# Altium footprint library UCP.PcbLib: 222 footprints (part 7 of 14)
Each footprint in its own frame and in the unit in brackets; x right, y up, seen from the top. Pads: shape width x height; smd on the part's side, far side on the other; paste and mask are expansions set on the pad; w line width, h text height; cw(c..) or ccw(c..) is an arc to the next point about the centre after c.
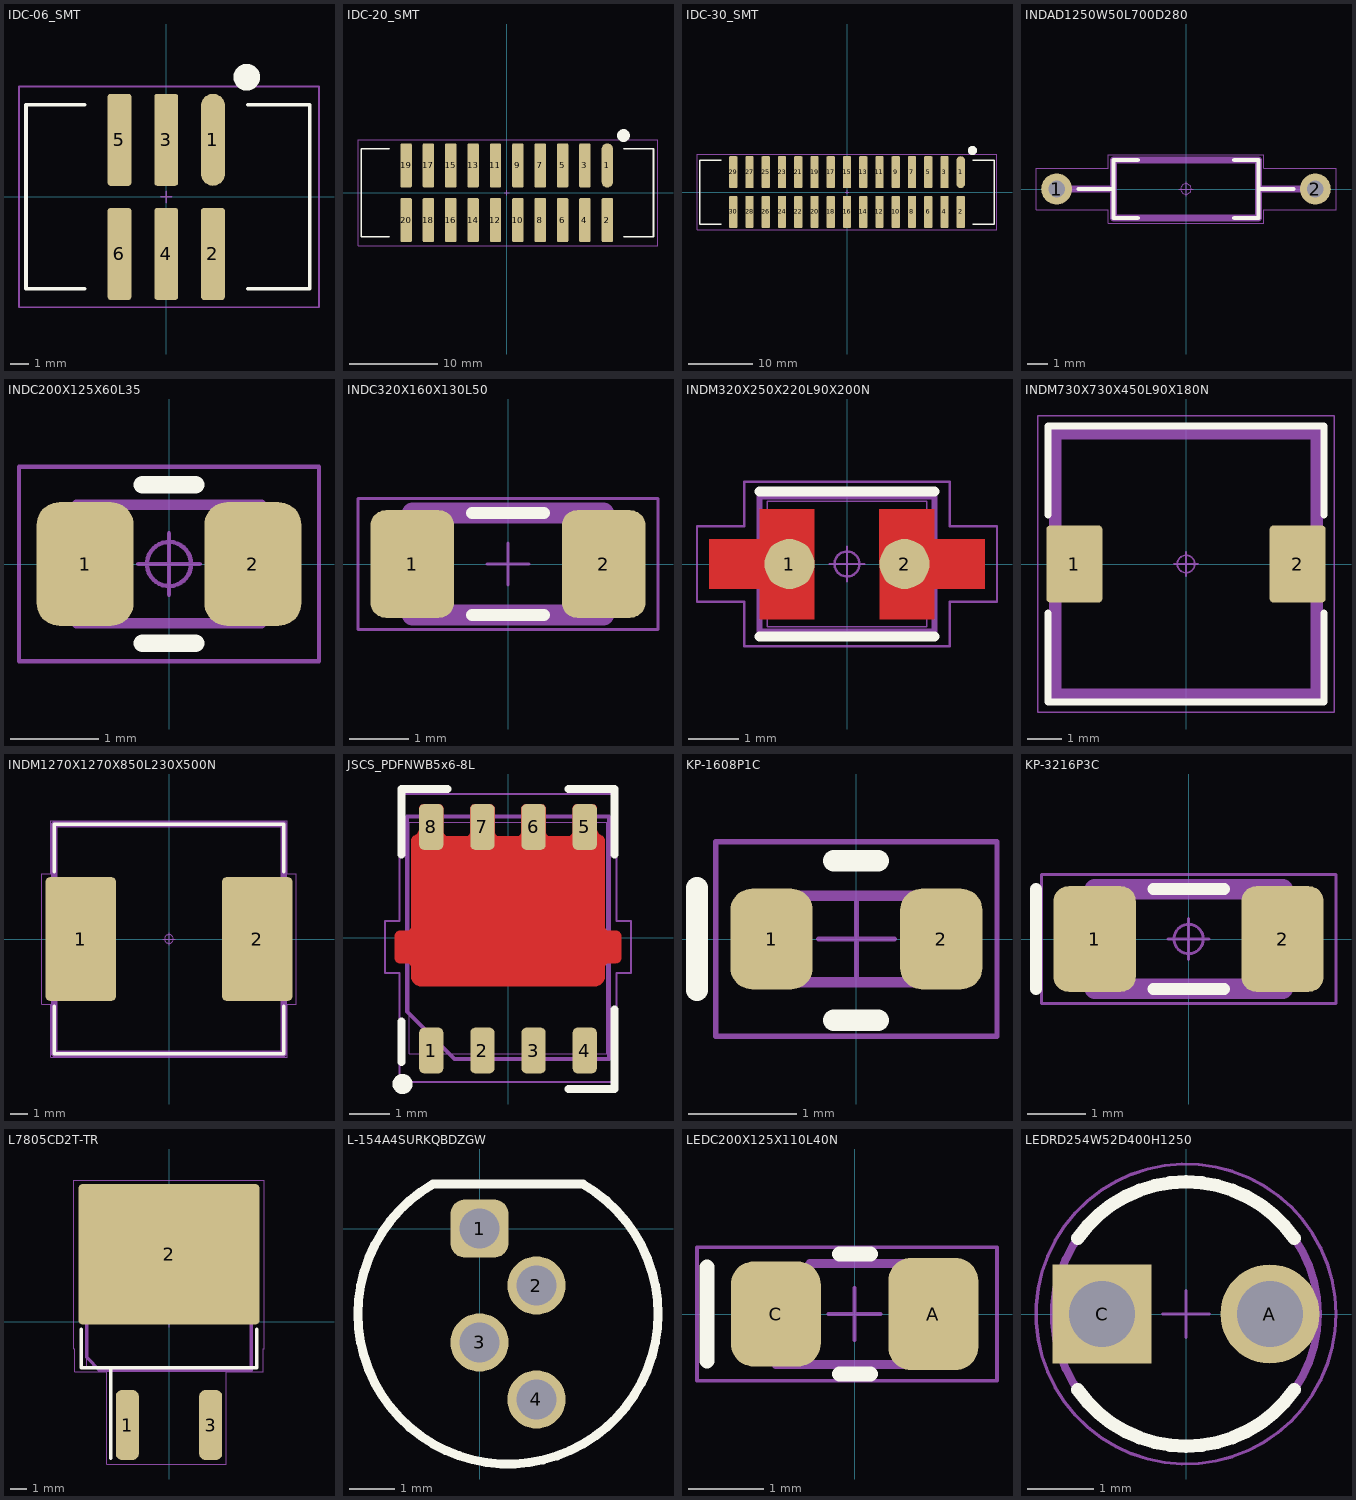
[diagram p6: the footprints below, top view; thin cyan lines are the x and y axes]

## IDC-06_SMT [mm]
height 10.5
pads (6):
  oval 1.3x5 smd: 1(2.54,3.1)
  rrect25% 1.3x5 smd: 2(2.54,-3.1) 3(0,3.1) 4(0,-3.1) 5(-2.54,3.1) 6(-2.54,-3.1)
Top Overlay:
  circle w0.75: c4.375,6.5 r0.35
  lines w0.2: -4.445,-5 -7.62,-5 -7.62,5 -4.445,5 ; 4.445,-5 7.8,-5 7.8,5 4.445,5
Top Designator:
  text ".Designator" at -4.511,-0.453 h2
Top Courtyard:
  lines w0.1: -0.3,0 0.3,0 ; 0,-0.3 0,0.3 ; -8,-6 -8,6 8.3,6 8.3,-6 -8,-6
3D body "BH_06_M.stp": height 10.12, standoff 0, extent -7.42,-4.8 7.62,4.8

## IDC-20_SMT [mm]
height 10.5
pads (20):
  oval 1.3x5 smd: 1(11.43,3.1)
  rrect25% 1.3x5 smd: 2(11.43,-3.1) 3(8.89,3.1) 4(8.89,-3.1) 5(6.35,3.1) 6(6.35,-3.1) 7(3.81,3.1) 8(3.81,-3.1) 9(1.27,3.1) 10(1.27,-3.1) 11(-1.27,3.1) 12(-1.27,-3.1) 13(-3.81,3.1) 14(-3.81,-3.1) 15(-6.35,3.1) 16(-6.35,-3.1) 17(-8.89,3.1) 18(-8.89,-3.1) 19(-11.43,3.1) 20(-11.43,-3.1)
Top Overlay:
  circle w0.75: c13.265,6.5 r0.35
  lines w0.2: -13.335,-5 -16.51,-5 -16.51,5 -13.335,5 ; 13.335,-5 16.69,-5 16.69,5 13.335,5
Top Designator:
  text ".Designator" at -4.511,-0.453 h2
Top Courtyard:
  lines w0.1: -0.3,0 0.3,0 ; 0,-0.3 0,0.3 ; -16.89,-6 -16.89,6 17.19,6 17.19,-6 -16.89,-6
3D body "61232020621.stp": height 10.55, standoff 0.04, extent -16.51,-4.75 16.51,4.75

## IDC-30_SMT [mm]
height 10.5
pads (30):
  oval 1.3x5 smd: 1(17.78,3.1)
  rrect25% 1.3x5 smd: 2(17.78,-3.1) 3(15.24,3.1) 4(15.24,-3.1) 5(12.7,3.1) 6(12.7,-3.1) 7(10.16,3.1) 8(10.16,-3.1) 9(7.62,3.1) 10(7.62,-3.1) 11(5.08,3.1) 12(5.08,-3.1) 13(2.54,3.1) 14(2.54,-3.1) 15(0,3.1) 16(0,-3.1) 17(-2.54,3.1) 18(-2.54,-3.1) 19(-5.08,3.1) 20(-5.08,-3.1) 21(-7.62,3.1) 22(-7.62,-3.1) 23(-10.16,3.1) 24(-10.16,-3.1) 25(-12.7,3.1) 26(-12.7,-3.1) 27(-15.24,3.1) 28(-15.24,-3.1) 29(-17.78,3.1) 30(-17.78,-3.1)
Top Overlay:
  circle w0.75: c19.615,6.5 r0.35
  lines w0.2: -19.685,-5 -23.05,-5 -23.05,5 -19.685,5 ; 19.685,-5 23.05,-5 23.05,5 19.685,5
Top Designator:
  text ".Designator" at -4.511,-0.453 h2
Top Courtyard:
  lines w0.1: -0.3,0 0.3,0 ; 0,-0.3 0,0.3 ; -23.45,-5.9 -23.45,5.9 23.45,5.9 23.45,-5.9 -23.45,-5.9
3D body "IDC-30.stp": height 10.2, standoff 0, extent -22.85,-4.75 22.85,4.75

## INDAD1250W50L700D280 [mm] "Inductor, Axial; 12.50 mm C X 0.50 mm W 7.00 mm L X 2.80 mm Dia body"
height 2.8
pads (2):
  round 1.5 hole 0.8 paste-1.5: 1(-6.25,0) 2(6.25,0)
Top Overlay:
  lines w0.2: -5.2,0 -3.5,0 ; -2.33,-1.4 -3.5,-1.4 -3.5,1.4 -2.33,1.4 ; 2.33,-1.4 3.5,-1.4 3.5,1.4 2.33,1.4 ; 3.5,0 5.2,0
Top Designator:
  text ".Designator" at 0,0 h1.2
Top Assembly:
  lines w0.35: -5.5,0 -3.5,0 ; 3.5,0 5.5,0 ; -3.5,-1.4 -3.5,1.4 3.5,1.4 3.5,-1.4 -3.5,-1.4
Top Courtyard:
  circle w0.05: c0,0 r0.25
  lines w0.05: -0.35,0 0.35,0 ; 0,-0.35 0,0.35 ; -7.25,-1 -7.25,1 -3.75,1 -3.75,1.65 3.75,1.65 3.75,1 7.25,1 7.25,-1 3.75,-1 3.75,-1.65 -3.75,-1.65 -3.75,-1 -7.25,-1
Top Component Outline:
  lines w0.05: -3.5,-1.4 -3.5,1.4 3.5,1.4 3.5,-1.4 -3.5,-1.4
Top Component Terminal:
  circle w0.05: c-6.25,0 r0.275
  circle w0.05: c6.25,0 r0.275
3D body "INDAD1250W50L700D280.STEP": height 2.8, standoff -2, extent -6.5,-1.4 6.5,1.4

## INDC200X125X60L35 [mm] "Inductor, Chip; 2.00 mm L X 1.25 mm W X 0.60 mm H body"
height 0.6
pads (2):
  rrect46% 1.1x1.4 smd: 1(-0.95,0) 2(0.95,0)
Top Overlay:
  lines w0.2: -0.3,-0.9 0.3,-0.9 ; -0.3,0.9 0.3,0.9
Top Designator:
  text ".Designator" at -4.511,-0.453 h2
Top Assembly:
  lines w0.1: -1.05,-0.68 1.05,-0.68 1.05,0.68 -1.05,0.68 -1.05,-0.68
Top Courtyard:
  circle w0.05: c0,0 r0.25
  lines w0.05: -0.35,0 0.35,0 ; 0,-0.35 0,0.35 ; -1.7,-1.1 -1.7,1.1 1.7,1.1 1.7,-1.1 -1.7,-1.1
Top Component Outline:
  lines w0.025: -1,-0.625 1,-0.625 1,0.625 -1,0.625 -1,-0.625
Top Component Terminal:
  lines w0.025: -1,-0.625 -1,0.625 -0.5,0.625 -0.5,-0.625 -1,-0.625 ; 0.5,-0.625 1,-0.625 1,0.625 0.5,0.625 0.5,-0.625
3D body "WE-CBF_0805_CBF.stp": height 0.9, standoff 0, extent -1,-0.6 1,0.6

## INDC320X160X130L50 [mm]
height 1.3
pads (2):
  rrect36% 1.4x1.8 smd: 1(-1.6,0) 2(1.6,0)
Top Overlay:
  lines w0.2: -0.605,-0.85 0.605,-0.85 ; -0.605,0.85 0.605,0.85
Top Designator:
  text ".Designator" at 0,0 h2
Top Assembly:
  lines w0.35: -1.6,-0.85 1.6,-0.85 1.6,0.85 -1.6,0.85 -1.6,-0.85
Top Courtyard:
  lines w0.05: -0.35,0 0.35,0 ; 0,-0.35 0,0.35 ; -2.51,-1.1 2.51,-1.1 2.51,1.1 -2.51,1.1 -2.51,-1.1
Top Component Outline:
  lines w0.05: -1.55,-0.8 1.55,-0.8 1.55,0.8 -1.55,0.8 -1.55,-0.8
Top Component Terminal:
  lines w0.05: -1.55,-0.8 -1.55,0.8 -1.15,0.8 -1.15,-0.8 -1.55,-0.8 ; 1.15,-0.8 1.55,-0.8 1.55,0.8 1.15,0.8 1.15,-0.8
3D body "RESC310X160X65L40.STEP": height 0.65, standoff 0, extent -1.55,-0.8 1.55,0.8

## INDM320X250X220L90X200N [mm] "Inductor, Molded Body; 3.20 mm L X 2.50 mm W X 2.20 mm H body"
height 2.2
pads (2):
  round 1 smd: 1(-1.15,0) 2(1.15,0)
Top Layer:
  region: -2.75,0.5 -2.75,-0.5 -1.75,-0.5 -1.75,-1.1 -0.65,-1.1 -0.65,1.1 -1.75,1.1 -1.75,0.5
  region: 2.75,-0.5 2.75,0.5 1.75,0.5 1.75,1.1 0.65,1.1 0.65,-1.1 1.75,-1.1 1.75,-0.5
Top Overlay:
  lines w0.2: -1.75,-1.45 1.75,-1.45 ; -1.75,1.45 1.75,1.45
Top Designator:
  text ".Designator" at 0,0 h1.2
Top Assembly:
  lines w0.12: -1.75,-1.35 -1.75,1.35 1.75,1.35 1.75,-1.35 -1.75,-1.35
Top Courtyard:
  circle w0.05: c0,0 r0.25
  lines w0.05: -0.35,0 0.35,0 ; 0,-0.35 0,0.35 ; -3,-0.75 -3,0.75 -2.05,0.75 -2.05,1.65 2.05,1.65 2.05,0.75 3,0.75 3,-0.75 2.05,-0.75 2.05,-1.65 -2.05,-1.65 -2.05,-0.75 -3,-0.75
Top Component Outline:
  lines w0.025: -1.6,-1.25 -1.6,1.25 1.6,1.25 1.6,-1.25 -1.6,-1.25
Top Component Terminal:
  lines w0.025: -1.6,-1 -0.7,-1 -0.7,1 -1.6,1 -1.6,-1 ; 0.7,-1 0.7,1 1.6,1 1.6,-1 0.7,-1
3D body "LQH32MN220J23L.STEP": height 2.2, standoff 0, extent -1.6,-1.25 1.6,1.25

## INDM730X730X450L90X180N [mm] "Inductor, Molded Body; 7.30 mm L X 7.30 mm W X 4.50 mm H body"
height 8.5
pads (2):
  rrect12% 1.6x2.2 smd: 1(-3.2,0) 2(3.2,0)
Top Overlay:
  lines w0.2: -3.95,-1.4 -3.95,-3.95 3.95,-3.95 3.95,-1.4 ; -3.95,1.4 -3.95,3.95 3.95,3.95 3.95,1.4
Top Designator:
  text ".Designator" at 0,0 h1.2
Top Assembly:
  lines w0.35: -3.75,-3.75 3.75,-3.75 3.75,3.75 -3.75,3.75 -3.75,-3.75
Top Courtyard:
  circle w0.05: c0,0 r0.25
  lines w0.05: -0.35,0 0.35,0 ; 0,-0.35 0,0.35 ; -4.25,-4.25 -4.25,4.25 4.25,4.25 4.25,-4.25 -4.25,-4.25
Top Component Outline:
  lines w0.05: -3.75,-3.75 3.75,-3.75 3.75,3.75 -3.75,3.75 -3.75,-3.75
Top Component Terminal:
  lines w0.05: -3.6,-0.9 -3.6,0.9 -2.7,0.9 -2.7,-0.9 -3.6,-0.9 ; 2.7,-0.9 3.6,-0.9 3.6,0.9 2.7,0.9 2.7,-0.9
3D body "INDM730X730X450L90X180.stp": height 4.5, standoff 0, extent -3.75,-3.75 3.75,3.75

## INDM1270X1270X850L230X500N [mm] "Inductor, Molded Body; 12.70 mm L X 12.70 mm W X 8.50 mm H body"
height 8.5
pads (2):
  rrect12% 4x7 smd: 1(-5,0) 2(5,0)
Top Overlay:
  lines w0.2: -6.5,-3.8 -6.5,-6.5 6.5,-6.5 6.5,-3.8 ; -6.5,3.8 -6.5,6.5 6.5,6.5 6.5,3.8
Top Designator:
  text ".Designator" at 0,0 h1.2
Top Assembly:
  lines w0.35: -6.5,-6.5 6.5,-6.5 6.5,6.5 -6.5,6.5 -6.5,-6.5
Top Courtyard:
  circle w0.05: c0,0 r0.25
  lines w0.05: -0.35,0 0.35,0 ; 0,-0.35 0,0.35 ; -7.2,-3.7 -6.7,-3.7 -6.7,-6.7 6.7,-6.7 6.7,-3.7 7.2,-3.7 7.2,3.7 6.7,3.7 6.7,6.7 -6.7,6.7 -6.7,3.7 -7.2,3.7 -7.2,-3.7
Top Component Outline:
  lines w0.05: -6.35,-6.35 6.35,-6.35 6.35,6.35 -6.35,6.35 -6.35,-6.35
Top Component Terminal:
  lines w0.05: -6.35,-2.5 -6.35,2.5 -4.05,2.5 -4.05,-2.5 -6.35,-2.5 ; 4.05,-2.5 6.35,-2.5 6.35,2.5 4.05,2.5 4.05,-2.5
3D body "INDM1270X1270X850L230X500.STEP": height 8.5, standoff 0, extent -6.35,-6.35 6.35,6.35

## JSCS_PDFNWB5x6-8L [mm]
pads (8):
  rrect40% 0.6x1.135 smd paste-10: 1(-1.905,-2.794) 2(-0.635,-2.794) 3(0.635,-2.794) 4(1.905,-2.794) 5(1.905,2.758) 6(0.635,2.758) 7(-0.635,2.758) 8(-1.905,2.758)
Top Layer:
  region: 197 vertices and 0 holes, not listed, extent -2.81,-1.2 2.81,3.325
Top Overlay:
  circle w0.25: c-2.619,-3.625 r0.125
  lines w0.2: -2.65,-3.075 -2.65,-2.075 ; -2.65,2.075 -2.65,3.7 -1.5,3.7 ; 1.5,-3.75 2.65,-3.75 2.65,-1.775 ; 1.5,3.7 2.65,3.7 2.65,2.075
Top Paste:
  rectangle: 0.75,1.05 1.75,2.05
  rectangle: -0.45,1.05 0.45,2.05
  rectangle: 0.75,-0.25 1.75,0.75
  rectangle: -0.45,-0.25 0.45,0.75
  rectangle: -1.75,-0.25 -0.75,0.75
  rectangle: -1.75,1.05 -0.75,2.05
  rectangle: -2.155,-3.269 -1.655,-2.319
  rectangle: -0.885,-3.269 -0.385,-2.319
  rectangle: 0.385,-3.269 0.885,-2.319
  rectangle: 1.655,-3.269 2.155,-2.319
Top Assembly:
  lines w0.1: -2.51,-1.826 -2.51,3.018 2.506,3.018 2.506,-3.009 -1.327,-3.009 -2.51,-1.826
Top Courtyard:
  lines w0.05: -0.25,0 0.25,0 ; 0,-0.25 0,0.25 ; -3.06,-0.875 -2.7,-0.875 -2.7,-3.575 2.7,-3.575 2.7,-0.875 3.06,-0.875 3.06,0.425 2.7,0.425 2.7,3.575 -2.7,3.575 -2.7,0.425 -3.06,0.425 -3.06,-0.875
Top Component Outline:
  lines w0.025: -2.45,-2.875 -2.45,2.875 2.45,2.875 2.45,-2.875 -2.45,-2.875
Top Component Terminal:
  lines w0.025: -2.51,-0.35 -2.36,-0.35 -2.105,-0.425 -2.105,-0.525 -2.005,-0.525 -2.005,-1.1 2.005,-1.1 2.005,-0.525 2.105,-0.525 2.105,-0.425 2.36,-0.35 2.51,-0.35 2.51,-0.1 2.36,-0.1 2.105,-0.025 2.105,0.075 2.005,0.075 2.005,1.48 2.105,1.48 2.105,1.58 2.31,1.63 2.31,1.93 2.105,1.98 2.105,2.08 2.005,2.08 2.005,2.39 2.105,2.39 2.105,2.675 2.055,2.825 2.055,3.025 1.755,3.025 1.755,2.825 1.705,2.675 1.705,2.475 1.605,2.475 1.605,2.375 0.935,2.375 0.935,2.475 0.835,2.475 0.835,2.675 0.785,2.825 0.785,3.025 0.485,3.025 0.485,2.825 0.435,2.675 0.435,2.475 0.335,2.475 0.335,2.375 -0.335,2.375 -0.335,2.475 -0.435,2.475 -0.435,2.675 -0.485,2.825 -0.485,3.025 -0.785,3.025 -0.785,2.825 -0.835,2.675 -0.835,2.475 -0.935,2.475 -0.935,2.375 -1.605,2.375 -1.605,2.475 -1.705,2.475 -1.705,2.675 -1.755,2.825 -1.755,3.025 -2.055,3.025 -2.055,2.825 -2.105,2.675 -2.105,2.39 -2.005,2.39 -2.005,2.08 -2.105,2.08 -2.105,1.98 -2.31,1.93 -2.31,1.63 -2.105,1.58 -2.105,1.48 -2.005,1.48 -2.005,0.075 -2.105,0.075 -2.105,-0.025 -2.36,-0.1 -2.51,-0.1 -2.51,-0.35 ; -2.105,-2.675 -2.105,-2.39 -1.705,-2.39 -1.705,-2.675 -1.755,-2.825 -1.755,-3.025 -2.055,-3.025 -2.055,-2.825 -2.105,-2.675 ; -0.835,-2.675 -0.835,-2.39 -0.435,-2.39 -0.435,-2.675 -0.485,-2.825 -0.485,-3.025 -0.785,-3.025 -0.785,-2.825 -0.835,-2.675 ; 0.435,-2.675 0.435,-2.39 0.835,-2.39 0.835,-2.675 0.785,-2.825 0.785,-3.025 0.485,-3.025 0.485,-2.825 0.435,-2.675 ; 1.705,-2.675 1.755,-2.825 1.755,-3.025 2.055,-3.025 2.055,-2.825 2.105,-2.675 2.105,-2.39 1.705,-2.39 1.705,-2.675
3D body "PDFNWB5x6-8L.stp": height 1, standoff 0, extent -2.51,-3.025 2.51,3.025

## KP-1608P1C [mm] "LED, Chip; 2.00 mm L X 1.25 mm W X 1.10 mm H body"
height 1.1
pads (2):
  rrect51% 0.76x0.93 smd: 1(-0.785,0) 2(0.785,0)
Top Overlay:
  lines w0.2: -1.475,-0.475 -1.475,0.475 ; -0.21,-0.75 0.2,-0.75 ; -0.21,0.725 0.2,0.725
Top Designator:
  text ".Designator" at -4.511,-0.453 h2
Top Assembly:
  lines w0.1: -0.8,-0.4 0.8,-0.4 0.8,0.4 -0.526,0.4 -0.8,0.126 -0.8,-0.4
Top Courtyard:
  lines w0.05: -0.35,0 0.35,0 ; 0,-0.35 0,0.35 ; -1.3,-0.9 -1.3,0.9 1.3,0.9 1.3,-0.9 -1.3,-0.9
Top Component Outline:
  lines w0.025: -0.8,-0.4 0.8,-0.4 0.8,0.4 -0.8,0.4 -0.8,-0.4
Top Component Terminal:
  lines w0.025: -1,-0.4 -0.6,-0.4 -0.6,0.4 -1,0.4 -1,-0.4 ; 0.6,-0.4 0.6,0.4 1,0.4 1,-0.4 0.6,-0.4

## KP-3216P3C [mm] "Phototransistor, Chip; 3.10 mm L X 1.60 mm W X 1.1 mm H body"
height 1.1
pads (2):
  rrect36% 1.4x1.8 smd: 1(-1.6,0) 2(1.6,0)
Top Overlay:
  lines w0.2: -2.6,-0.85 -2.6,0.85 ; -0.605,-0.85 0.605,-0.85 ; -0.605,0.85 0.605,0.85
Top Designator:
  text ".Designator" at 0,0 h1.2
Top Assembly:
  lines w0.35: -1.6,-0.85 -1.6,0.85 1.6,0.85 1.6,-0.85 -1.6,-0.85
Top Courtyard:
  circle w0.05: c0,0 r0.25
  lines w0.05: -0.35,0 0.35,0 ; 0,-0.35 0,0.35 ; -2.51,-1.1 -2.51,1.1 2.51,1.1 2.51,-1.1 -2.51,-1.1
Top Component Outline:
  lines w0.05: -1.55,-0.8 -1.55,0.8 1.55,0.8 1.55,-0.8 -1.55,-0.8
Top Component Terminal:
  lines w0.05: -1.55,-0.8 -1.15,-0.8 -1.15,0.8 -1.55,0.8 -1.55,-0.8 ; 1.15,-0.8 1.15,0.8 1.55,0.8 1.55,-0.8 1.15,-0.8
3D body "RESC310X160X65L40.STEP": height 0.65, standoff 0, extent -1.55,-0.8 1.55,0.8

## L7805CD2T-TR [mm]
pads (3):
  rrect50% 1.4x4.25 smd: 1(-2.54,-6.3) 3(2.54,-6.3)
  rrect5% 11x8.55 smd paste-10.79: 2(0,4.1)
Top Overlay:
  lines w0.2: -5.34,-0.475 -5.34,-2.808 5.34,-2.808 5.34,-0.475 ; -3.54,-8.325 -3.54,-2.81
Top Paste:
  region: -4.11,6.537 -4.11,8.047 -5.31,8.047 -5.31,6.537
  region: -2.54,6.537 -2.54,8.047 -3.74,8.047 -3.74,6.537
  region: 3.74,6.537 3.74,8.047 2.54,8.047 2.54,6.537
  region: 5.31,6.537 5.31,8.047 4.11,8.047 4.11,6.537
  region: 0.6,6.537 0.6,8.047 -0.6,8.047 -0.6,6.537
  region: 2.17,6.537 2.17,8.047 0.97,8.047 0.97,6.537
  region: -0.97,6.537 -0.97,8.047 -2.17,8.047 -2.17,6.537
  region: -5.31,1.663 -5.31,0.153 -4.11,0.153 -4.11,1.663
  region: -3.74,1.663 -3.74,0.153 -2.54,0.153 -2.54,1.663
  region: 2.54,1.663 2.54,0.153 3.74,0.153 3.74,1.663
  region: 4.11,1.663 4.11,0.153 5.31,0.153 5.31,1.663
  region: -0.6,1.663 -0.6,0.153 0.6,0.153 0.6,1.663
  region: 0.97,1.663 0.97,0.153 2.17,0.153 2.17,1.663
  region: -2.17,1.663 -2.17,0.153 -0.97,0.153 -0.97,1.663
  region: -4.11,4.409 -4.11,5.919 -5.31,5.919 -5.31,4.409
  region: -2.54,4.409 -2.54,5.919 -3.74,5.919 -3.74,4.409
  region: 3.74,4.409 3.74,5.919 2.54,5.919 2.54,4.409
  region: 5.31,4.409 5.31,5.919 4.11,5.919 4.11,4.409
  region: 0.6,4.409 0.6,5.919 -0.6,5.919 -0.6,4.409
  region: 2.17,4.409 2.17,5.919 0.97,5.919 0.97,4.409
  region: -0.97,4.409 -0.97,5.919 -2.17,5.919 -2.17,4.409
  region: -5.31,3.791 -5.31,2.281 -4.11,2.281 -4.11,3.791
  region: -3.74,3.791 -3.74,2.281 -2.54,2.281 -2.54,3.791
  region: 2.54,3.791 2.54,2.281 3.74,2.281 3.74,3.791
  region: 4.11,3.791 4.11,2.281 5.31,2.281 5.31,3.791
  region: -0.6,3.791 -0.6,2.281 0.6,2.281 0.6,3.791
  region: 0.97,3.791 0.97,2.281 2.17,2.281 2.17,3.791
  region: -2.17,3.791 -2.17,2.281 -0.97,2.281 -0.97,3.791
Top Designator:
  text ".Designator" at 0,0 h1.5
Top Assembly:
  lines w0.2: -5.017,-2.175 -4.207,-2.985 5.017,-2.985 5.017,7.62 -5.017,7.62 -5.017,-2.175
Top Courtyard:
  lines w0.05: -0.35,0 0.35,0 ; 0,-0.35 0,0.35 ; -5.795,-1.66 -5.795,8.625 5.795,8.625 5.795,-1.66 5.74,-1.66 5.74,-3.058 3.49,-3.058 3.49,-8.675 -3.79,-8.675 -3.79,-3.058 -5.74,-3.058 -5.74,-1.66 -5.795,-1.66
Top Component Outline:
  lines w0.025: -5.017,-2.731 -5.017,6.414 5.017,6.414 5.017,-2.731 -5.017,-2.731
Top Component Terminal:
  lines w0.025: -5.335,0.027 5.335,0.027 5.335,7.65 -5.335,7.65 -5.335,0.027 ; -3.035,-7.62 -3.035,-5.16 -2.045,-5.16 -2.045,-7.62 -3.035,-7.62 ; 2.045,-7.62 2.045,-5.16 3.035,-5.16 3.035,-7.62 2.045,-7.62
3D body "TO-263.stp": height 4.84, standoff 0, extent -5.017,-7.621 5.017,7.619

## L-154A4SURKQBDZGW [mm]
pads (4):
  rrect50% 1.3x1.3 hole 0.9: 1(0,0)
  round 1.3 hole 0.9: 2(1.27,-1.27) 3(0,-2.54) 4(1.27,-3.81)
Top Overlay:
  lines w0.2: 2.309,0.989 cw(c0.635,-1.905) -1.034,0.992 2.309,0.992
Top Designator:
  text ".Designator" at -4.511,-0.453 h2

## LEDC200X125X110L40N [mm] "LED, Chip; 2.00 mm L X 1.25 mm W X 1.10 mm H body"
height 1.1
pads (2):
  rrect51% 1.2x1.5 smd: A(1.05,0)
  rrect51% 1.2x1.4 smd: C(-1.05,0)
Top Overlay:
  lines w0.2: -1.965,-0.63 -1.965,0.63 ; -0.2,-0.8 0.21,-0.8 ; -0.2,0.8 0.21,0.8
Top Designator:
  text ".Designator" at -4.511,-0.453 h2
Top Assembly:
  lines w0.1: -1.05,-0.68 1.05,-0.68 1.05,0.68 -0.597,0.68 -1.05,0.227 -1.05,-0.68
Top Courtyard:
  lines w0.05: -0.35,0 0.35,0 ; 0,-0.35 0,0.35 ; -2.1,-0.89 1.9,-0.89 1.9,0.89 -2.1,0.89 -2.1,-0.89
Top Component Outline:
  lines w0.025: -1,-0.625 1,-0.625 1,0.625 -1,0.625 -1,-0.625
Top Component Terminal:
  lines w0.025: -1,-0.625 -1,0.625 -0.6,0.625 -0.6,-0.625 -1,-0.625 ; 0.6,-0.625 1,-0.625 1,0.625 0.6,0.625 0.6,-0.625
3D body "LEDC200X125X110L40.STEP": height 1.45, standoff 0, extent -1,-0.625 1,0.625

## LEDRD254W52D400H1250 [mm] "Radial (LED); 2.54 mm C X 4.00 mm Dia X 12.50 mm H body"
height 12.5
pads (2):
  round 1.5 hole 1 paste-1.5: A(1.27,0)
  rect 1.5x1.5 / inner round 1.5 / far side rect 1.5x1.5 hole 1 paste-1.5: C(-1.27,0)
Top Overlay:
  lines w0.2: -1.638,-1.147 ccw(c0,0) 1.638,-1.147 ; -1.638,1.147 cw(c0,0) 1.638,1.147
Top Designator:
  text ".Designator" at 0,0 h1.2
Top Assembly:
  circle w0.12: c0,0 r2
Top Courtyard:
  circle w0.05: c0,0 r2.27
  lines w0.05: -0.35,0 0.35,0 ; 0,-0.35 0,0.35
Top Component Outline:
  circle w0.025: c0,0 r2
Top Component Terminal:
  lines w0.025: -1.57,-0.3 -1.57,0.3 -0.97,0.3 -0.97,-0.3 -1.57,-0.3 ; 0.97,-0.3 0.97,0.3 1.57,0.3 1.57,-0.3 0.97,-0.3
3D body "LEDRD254W52D400H1250.STEP": height 12.5, standoff -2, extent -2,-2 2,2